# Altium schematic symbol library Alim_SDK_hex_pcb.SchLib: 14 symbols
Pins are listed as number, name and electrical type; pins without a type are passive.

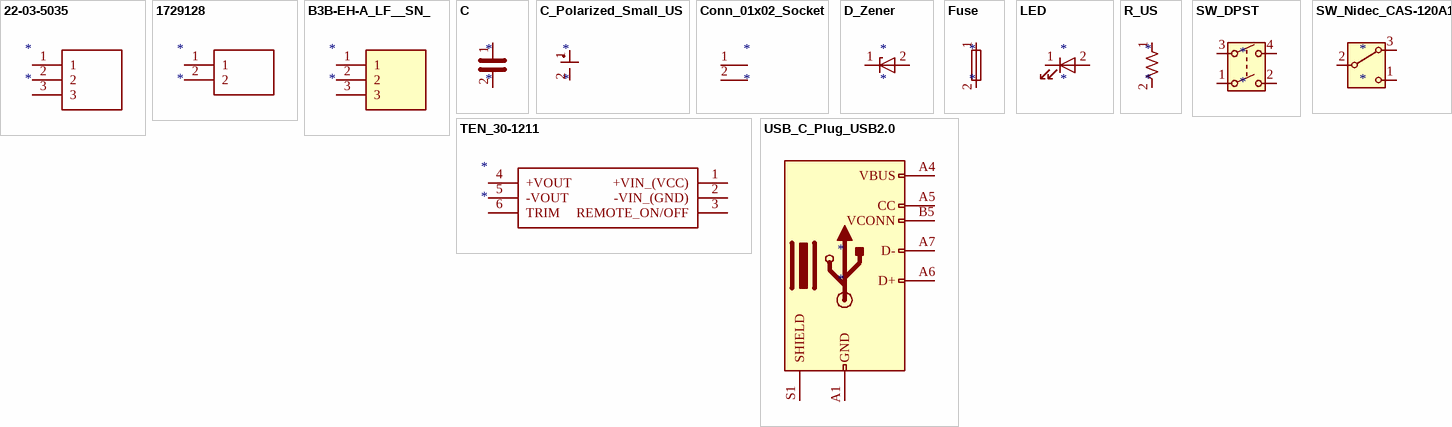
[diagram p0: symbols 22-03-5035 to USB_C_Plug_USB2.0]

## 22-03-5035
designator *
pins: 1, 2, 3

## 1729128
designator *
pins: 1, 2

## B3B-EH-A_LF__SN_
designator *
pins: 1, 2, 3

## C
designator *
pins: 1, 2

## C_Polarized_Small_US
designator *
pins: 1, 2

## Conn_01x02_Socket
designator *
pins: 1 Pin_1, 2 Pin_2

## D_Zener
designator *
pins: 1 K, 2 A

## Fuse
designator *
pins: 1, 2

## LED
designator *
pins: 1 K, 2 A

## R_US
designator *
pins: 1, 2

## SW_DPST
designator *
pins: 1, 2, 3, 4

## SW_Nidec_CAS-120A1
designator *
pins: 1 C, 2 B, 3 A

## TEN_30-1211
designator *
pins: 1 +VIN_(VCC), 2 -VIN_(GND), 3 REMOTE_ON/OFF, 4 +VOUT, 5 -VOUT, 6 TRIM

## USB_C_Plug_USB2.0
designator *
pins: A1 GND, A4 VBUS, A5 CC, A6 D+, A7 D-, A9 VBUS hidden, A12 GND hidden, B1 GND hidden, B4 VBUS hidden, B5 VCONN, B9 VBUS hidden, B12 GND hidden, S1 SHIELD